# Altium footprint library ACB_PcbLib.PcbLib: 152 footprints (part 8 of 10)
Each footprint in its own frame and in the unit in brackets; x right, y up, seen from the top. Pads: shape width x height; smd on the part's side, far side on the other; paste and mask are expansions set on the pad; w line width, h text height; cw(c..) or ccw(c..) is an arc to the next point about the centre after c.
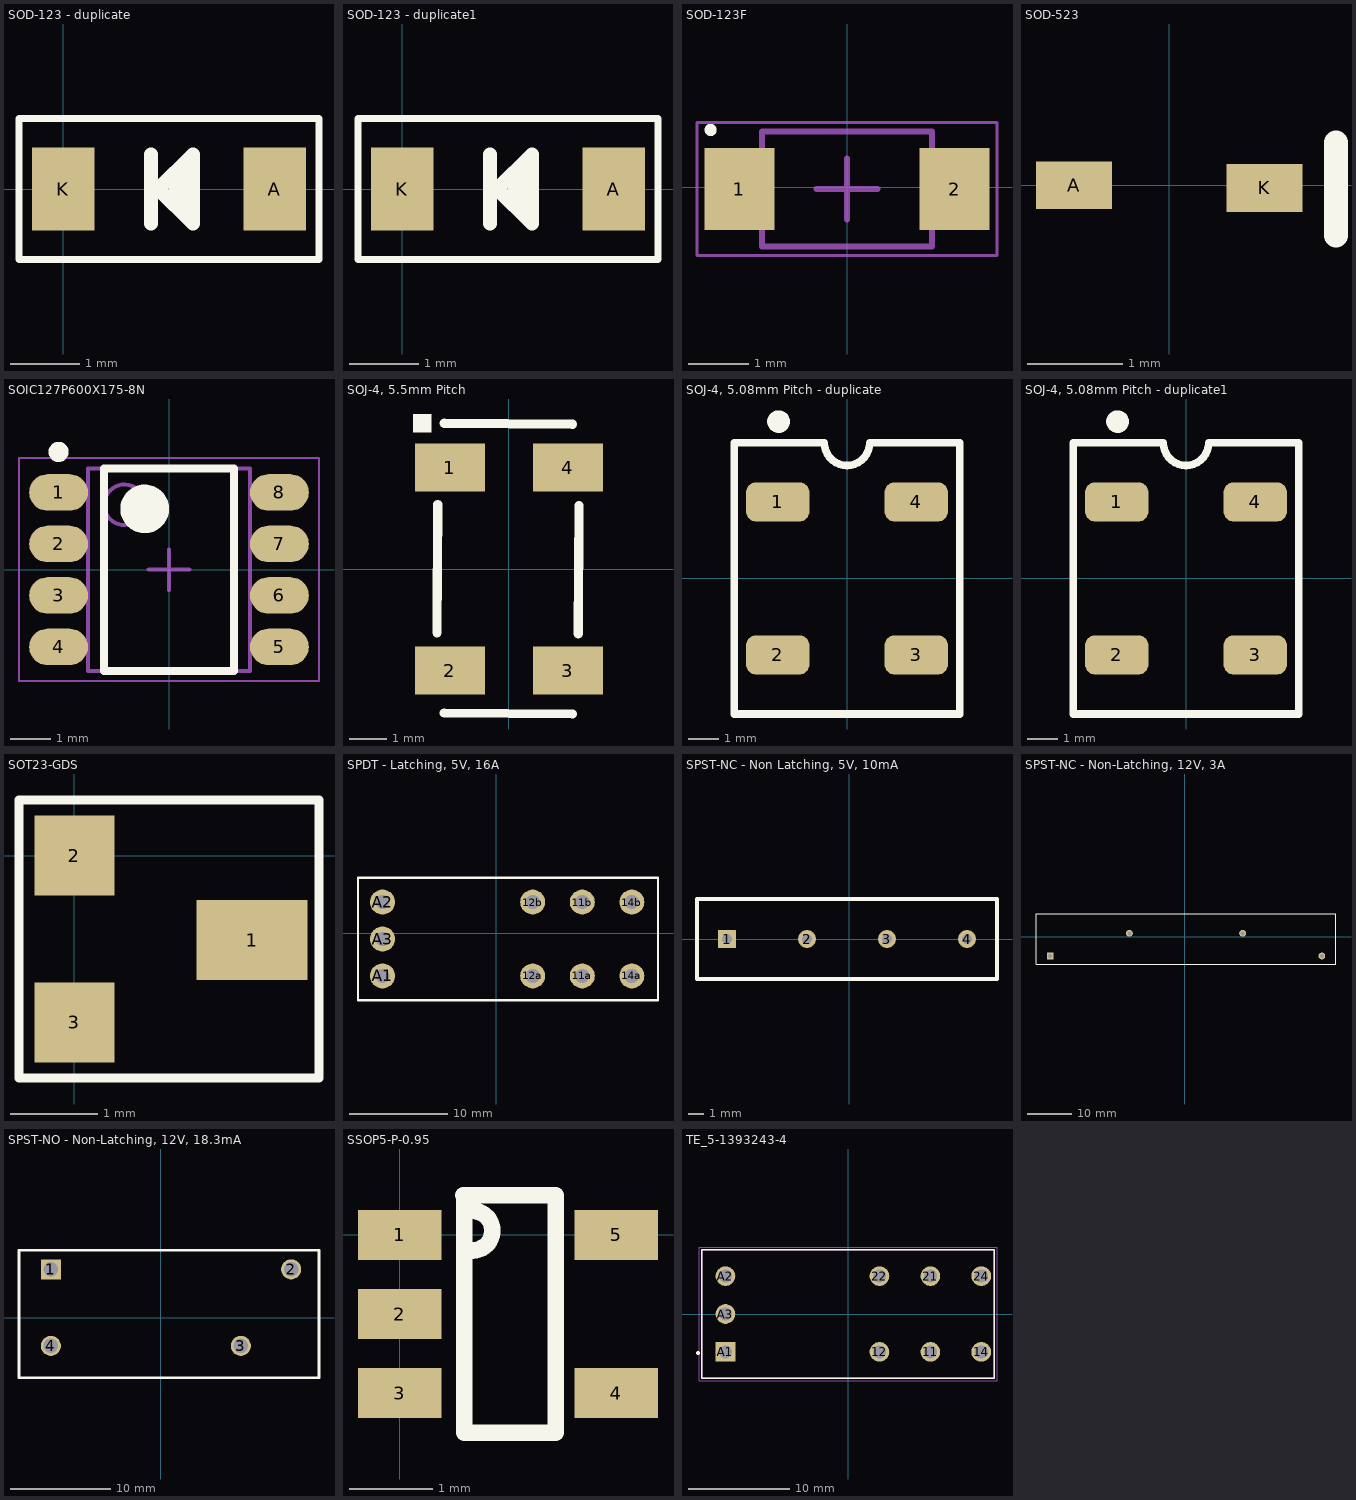
[diagram p7: the footprints below, top view; thin cyan lines are the x and y axes]

## SOD-123 - duplicate [mm]
pads (2):
  rect 0.9x1.2 smd: A(3.048,0) K(0,0)
Top Overlay:
  lines w0.102: -0.635,-1.016 -0.635,1.016 3.683,1.016 3.683,-1.016 -0.635,-1.016
  lines w0.2: 1.267,-0.5 1.267,0.5 ; 1.617,-0.15 1.617,0.15 ; 1.767,-0.3 1.767,0.3 ; 1.367,0 1.867,-0.5 1.867,0.5 1.367,0
3D body: height 0.7, standoff 0, extent 2.987,-0.225 3.112,0.275
3D body: height 0.7, standoff 0.5, extent 2.9,-0.225 3,0.275
3D body: height 0.2, standoff 0, extent 3.1,-0.225 3.3,0.275
3D body: height 0.76, standoff 0, extent 0.225,-0.875 2.9,0.875
3D body: height 0.2, standoff 0, extent -0.175,-0.25 0.025,0.25
3D body: height 0.7, standoff 0.5, extent 0.125,-0.25 0.225,0.25
3D body: height 0.7, standoff 0, extent 0.013,-0.25 0.138,0.25
3D body: height 0.79, standoff 0.74, extent 0.475,-0.75 0.6,0.75

## SOD-123 - duplicate1 [mm]
pads (2):
  rect 0.9x1.2 smd: A(3.048,0) K(0,0)
Top Overlay:
  lines w0.102: -0.635,-1.016 3.683,-1.016 3.683,1.016 -0.635,1.016 -0.635,-1.016
  lines w0.2: 1.267,-0.5 1.267,0.5 ; 1.617,-0.15 1.617,0.15 ; 1.767,-0.3 1.767,0.3 ; 1.367,0 1.867,0.5 1.867,-0.5 1.367,0
3D body: height 0.79, standoff 0.74, extent 0.475,-0.75 0.6,0.75
3D body: height 0.7, standoff 0, extent 0.013,-0.25 0.138,0.25
3D body: height 0.7, standoff 0.5, extent 0.125,-0.25 0.225,0.25
3D body: height 0.2, standoff 0, extent -0.175,-0.25 0.025,0.25
3D body: height 0.76, standoff 0, extent 0.225,-0.875 2.9,0.875
3D body: height 0.2, standoff 0, extent 3.1,-0.225 3.3,0.275
3D body: height 0.7, standoff 0.5, extent 2.9,-0.225 3,0.275
3D body: height 0.7, standoff 0, extent 2.987,-0.225 3.112,0.275

## SOD-123F [mm]
pads (2):
  rect 1.15x1.35 smd: 1(-1.775,-0.027) 2(1.775,-0.027)
Top Overlay:
  circle w0.1: c-2.25,0.948 r0.05
Mechanical 13:
  lines w0.1: -1.4,-0.977 1.4,-0.977 1.4,0.923 -1.4,0.923 -1.4,-0.977
Mechanical 15:
  lines w0.05: -2.475,-1.127 2.475,-1.127 2.475,1.073 -2.475,1.073 -2.475,-1.127
  lines w0.1: -0.5,-0.027 0.5,-0.027 ; 0,-0.527 0,0.473
3D body: height 1.15, standoff 0, extent -1.4,-0.977 1.4,0.923

## SOD-523 [mm]
pads (2):
  rect 0.8x0.5 smd: A(-1,0) K(1,-0.027)
Top Overlay:
  lines w0.254: 1.75,-0.525 1.75,0.45
3D body: height 0.7, standoff 0, extent -1.15,-0.45 1.15,0.45

## SOIC127P600X175-8N [mm] "SOIC, 8-Leads, Body 4.90x3.90mm, Pitch 1.27mm, IPC Medium Density"
height 1.75
pads (8):
  oval 1.45x0.9 smd: 1(-2.725,1.905) 2(-2.725,0.635) 3(-2.725,-0.635) 4(-2.725,-1.905) 5(2.725,-1.905) 6(2.725,-0.635) 7(2.725,0.635) 8(2.725,1.905)
Top Overlay:
  circle w0.25: c-2.725,2.905 r0.125
  circle w0.6: c-0.6,1.5 r0.3
  lines w0.2: -1.6,-2.5 -1.6,2.5 1.6,2.5 1.6,-2.5 -1.6,-2.5
Mechanical 13:
  circle w0.1: c-1.1,1.6 r0.5
  lines w0.1: -2,-2.5 -2,2.5 2,2.5 2,-2.5 -2,-2.5
Mechanical 15:
  lines w0.05: -3.7,-2.75 -3.7,2.75 3.7,2.75 3.7,-2.75 -3.7,-2.75
  lines w0.1: -0.5,0 0.5,0 ; 0,-0.5 0,0.5
3D body: height 1.75, standoff 0.1, extent -2,-2.5 2,2.5

## SOJ-4, 5.5mm Pitch [mm]
pads (4):
  rect 1.9x1.3 smd: 1(-1.6,2.75) 2(-1.6,-2.75) 3(1.6,-2.75) 4(1.6,2.75)
Top Overlay:
  region: -2.6,4.2 -2.6,3.7 -2.1,3.7 -2.1,4.2
  lines w0.25: -1.95,-1.725 -1.925,1.75 ; -1.75,-3.9 1.725,-3.925 ; -1.75,3.95 1.725,3.925 ; 1.875,-1.75 1.9,1.725
3D body: height 2.5, standoff 0, extent -1.9,-4 1.9,4

## SOJ-4, 5.08mm Pitch - duplicate [mm]
pads (4):
  rrect50% 2.1x1.3 smd: 1(-2.314,2.54) 2(-2.314,-2.54) 3(2.286,-2.54) 4(2.286,2.54)
Top Overlay:
  circle w0.254: c-2.286,5.207 r0.25
  region: -2.54,5.461 -2.54,4.961 -2.04,4.961 -2.04,5.461
  lines w0.25: -0.764,4.5 -3.764,4.5 -3.764,-4.5 3.736,-4.5 3.736,4.5 0.736,4.5
  lines w0.254: -0.764,4.5 ccw(c-0.014,4.5) 0.736,4.5

## SOJ-4, 5.08mm Pitch - duplicate1 [mm]
pads (4):
  rrect50% 2.1x1.3 smd: 1(-2.314,2.54) 2(-2.314,-2.54) 3(2.286,-2.54) 4(2.286,2.54)
Top Overlay:
  circle w0.254: c-2.286,5.207 r0.25
  region: -2.54,5.461 -2.54,4.961 -2.04,4.961 -2.04,5.461
  lines w0.25: -0.764,4.5 -3.764,4.5 -3.764,-4.5 3.736,-4.5 3.736,4.5 0.736,4.5
  lines w0.254: -0.764,4.5 ccw(c-0.014,4.5) 0.736,4.5

## SOT23-GDS [mil]
pads (3):
  rect 50x36 smd: 1(80,-38)
  rect 36x36 smd: 2(0,0) 3(0,-75)
Top Overlay:
  lines w4: -24.88,11.02 -24.88,12.02 ; -24.88,15.02 -24.88,25.02 ; -10.88,25.02 -8.88,25.02 ; -9.88,25.02 -24.88,25.02 ; -24.88,25.02 110.12,25.02 110.12,-99.98 -24.88,-99.98 -24.88,25.02
3D body "SW3dPS-3-lead sot23-3.STEP": height 40.59, standoff 0.43, extent -3.48,-95 94,19.96

## SPDT - Latching, 5V, 16A [mil] "RT314F05"
height 618.11
pads (9):
  round 100 hole 57: 11a(344.21,-170.28) 11b(344.21,125) 12a(145.79,-170.28) 12b(145.79,125) 14a(542.64,-170.28) 14b(542.64,125) A1(-455,-170.28) A2(-455,125) A3(-455,-22.64)
Top Overlay:
  lines w10: -553.43,-268.7 -553.43,223.43 647.36,223.43 647.36,-268.7 -553.43,-268.7

## SPST-NC - Non Latching, 5V, 10mA [mil] "9001-05-02"
pads (4):
  rect 45x45 hole 25: 1(-305,0)
  round 45 hole 25: 2(-105,0) 3(95,0) 4(295,0)
Top Overlay:
  lines w10: -380,-100 -380,100 370,100 370,-100 -380,-100

## SPST-NC - Non-Latching, 12V, 3A [mil] "5502-12-1"
pads (4):
  rect 60x60 hole 35: 1(-1190,-170)
  round 60 hole 35: 2(-490,30) 3(510,30) 4(1210,-170)
Top Overlay:
  lines w10: -1315,-245 1335,-245 1335,205 -1315,205 -1315,-245

## SPST-NO - Non-Latching, 12V, 18.3mA [mil] "G6RL-1A DC12"
height 484.25
pads (4):
  rect 78.74x78.74 hole 57: 1(-430,190)
  round 78.74 hole 57: 2(510.94,190) 3(314.09,-110) 4(-430,-110)
Top Overlay:
  lines w10: -555,-235 620,-235 620,265 -555,265 -555,-235

## SSOP5-P-0.95 [mm]
pads (5):
  rect 1x0.6 smd: 1(0,0) 2(0,-0.95) 3(0,-1.9) 4(2.6,-1.9) 5(2.6,0)
Top Overlay:
  lines w0.2: 0.763,0.475 1.875,0.475 1.875,-2.375 0.775,-2.375 0.775,0.475 1.238,0.475 ; 0.875,-0.188 ccw(c0.875,0.05) 0.875,0.288
3D body: height 1.1, standoff 0, extent 0.497,-2.428 2.1,0.478

## TC4S584F [mm] "Inverter"

## TE_5-1393243-4 [mm]
pads (9):
  round 1.95 hole 1.3: 11(8.15,-3.75) 12(3.11,-3.75) 14(13.19,-3.75) 21(8.15,3.75) 22(3.11,3.75) 24(13.19,3.75) A2(-12.15,3.75) A3(-12.15,0)
  rect 1.95x1.95 hole 1.3: A1(-12.15,-3.75)
Top Overlay:
  circle w0.2: c-14.865,-3.87 r0.1
  lines w0.127: -14.5,-6.35 14.5,-6.35 14.5,6.35 -14.5,6.35 -14.5,-6.35
Mechanical 4:
  lines w0.127: -14.5,-6.35 14.5,-6.35 ; -14.5,-6.35 -14.5,6.35 ; -14.5,-6.35 14.5,-6.35 ; -14.5,-6.35 -14.5,6.35 ; -14.5,6.35 14.5,6.35 ; -14.5,6.35 14.5,6.35 ; 14.5,-6.35 14.5,6.35 ; 14.5,-6.35 14.5,6.35
Mechanical 16:
  lines w0.05: -14.75,-6.6 14.75,-6.6 14.75,6.6 -14.75,6.6 -14.75,-6.6
3D body: height 15.7, standoff 0, extent -14.5,-6.325 14.475,6.325